# Altium integrated library PAS_COMPONENTS.IntLib: 4 symbols
Pins are listed as number, name and electrical type; pins without a type are passive.

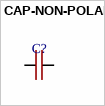
[diagram p0: symbol CAP-NON-POLAR]

## CAP-NON-POLAR
designator C?
footprint CAP-0201
footprint CAP-0402
footprint CAP-0603
footprint CAP-0805
footprint CAP-1206
footprint CAP-FILM-22.5X26.5X10
pins: 1, 2


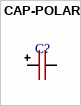
[diagram p1: symbol CAP-POLAR]

## CAP-POLAR
designator C?
footprint CAP-TAN-B
footprint CAP-TAN-C
footprint CAP-TAN-B2
footprint CAPPOL-12x25
footprint CAP-TAN-R
footprint CAP-TAN-X
footprint CAP-TAN-A
footprint CAPPOL-30x35
footprint CAPPOL-18x40
footprint CAP-TAN-D
footprint CAPPOL8x12
footprint CAPPOL_SMD_SIZE_B
footprint CAPPOL_SMD_SIZE_C
footprint CAPPOL_SMD_SIZE_D
footprint CAPPOL_SMD_SIZE_E
footprint CAPPOL_SMD_SIZE_F
footprint CAPPOL_SMD_SIZE_G
footprint CAPPOL-100x35
footprint CAPPOL-65x35
pins: 1 +, 2 -


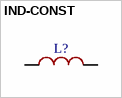
[diagram p2: symbol IND-CONST]

## IND-CONST
designator L?
footprint IND-8075
footprint CDRH127
footprint CDRH104R
footprint IND-1212
footprint IND-0603
footprint IND-1210
footprint IND-SRP0612
footprint IND-6045
footprint IND-5852
footprint IND-7850
footprint IND-5249
footprint IND-5652
footprint IND-1919
footprint IND-1207
footprint IND-4747
footprint IND-0805
footprint IND-1008-0.9
pins: 1, 2


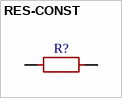
[diagram p3: symbol RES-CONST]

## RES-CONST
designator R?
footprint RES-1206
footprint RES-0805
footprint RES-0603
footprint RES-0201
footprint RES-3921
footprint RES-2512
footprint RES-2W
footprint RES-0402
pins: 1, 2